# Altium footprint library Protection.PcbLib: 8 footprints
Each footprint in its own frame and in the unit in brackets; x right, y up, seen from the top. Pads: shape width x height; smd on the part's side, far side on the other; paste and mask are expansions set on the pad; w line width, h text height; cw(c..) or ccw(c..) is an arc to the next point about the centre after c.
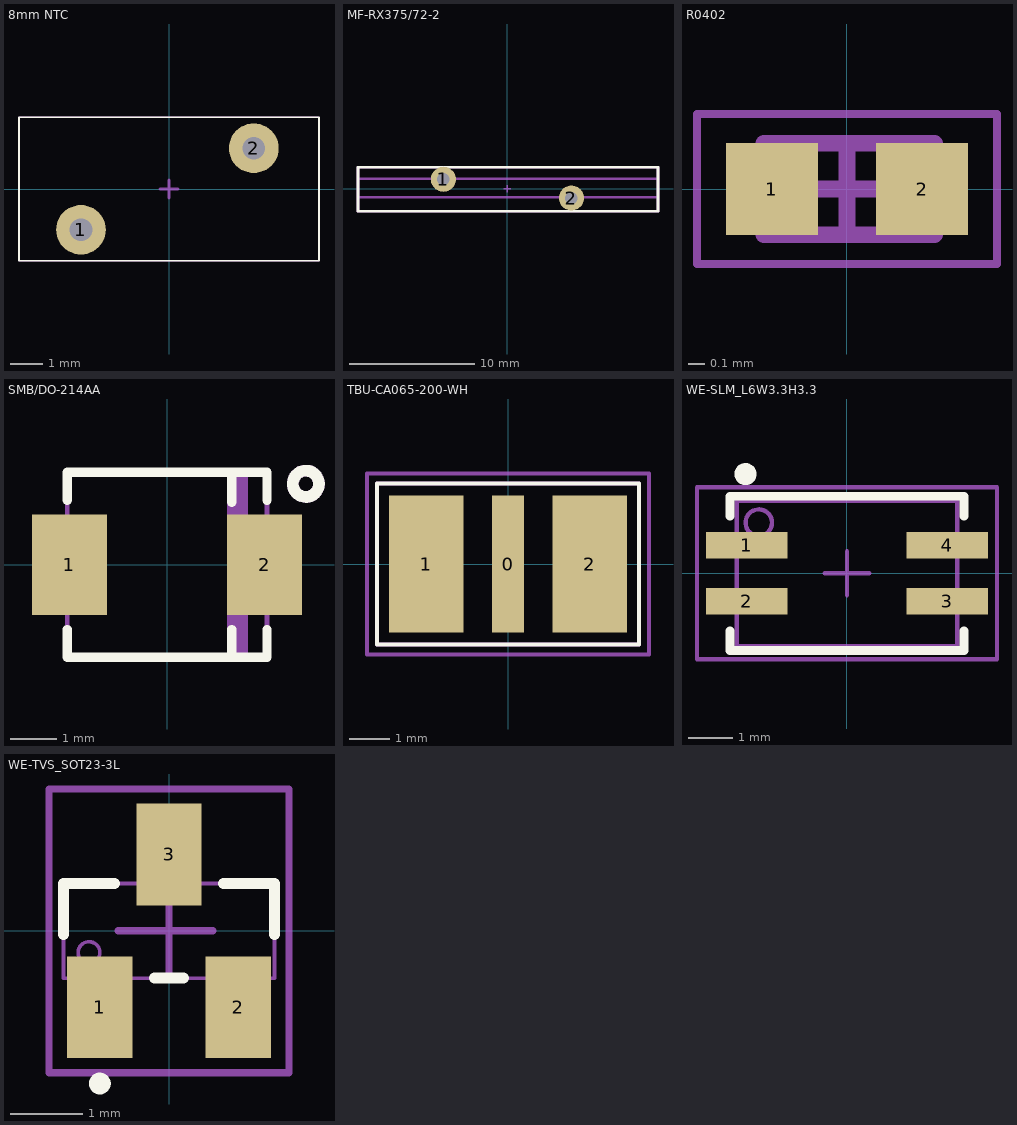
[diagram p0: the footprints below, top view; thin cyan lines are the x and y axes]

## 8mm NTC [mm]
height 0.4
pads (2):
  round 1.524 hole 0.7: 1(-2.7,-1.25) 2(2.6,1.25)
Top Overlay:
  lines w0.05: -4.6,-2.2 4.6,-2.2 4.6,2.2 -4.6,2.2 -4.6,-2.2
Top Assembly (Mech13):
  lines w0.05: -4.6,-2.2 4.6,-2.2 4.6,2.2 -4.6,2.2 -4.6,-2.2
  text ".Designator" at -0.775,-0.008 h0.2
Mechanical 15:
  lines w0.05: -4.6,-2.2 4.6,-2.2 4.6,2.2 -4.6,2.2 -4.6,-2.2
  lines w0.1: -0.275,0 0.275,0 ; 0,-0.275 0,0.275
3D body "User Library-SL08 20002.step": height 14.5, standoff -32.5, extent -4.5,-2.15 4.5,2.15

## MF-RX375/72-2 [mm]
height 0.4
pads (2):
  round 2 hole 1: 1(-5.1,0.75) 2(5.1,-0.75)
Top Overlay:
  lines w0.2: -11.9,-1.8 -1.199,-1.8 12,-1.8 12,1.7 1.3,1.7 -11.9,1.7 -11.9,-1.8
Top Assembly (Mech13):
  circle w0.7: c-5.1,0.75 r0.25
  circle w0.7: c5.1,-0.75 r0.25
  lines w0.2: -11.9,-0.7 -1.099,-0.7 12,-0.7 12,0.8 1.2,0.8 -11.9,0.8 -11.9,-0.7
  text ".Designator" at -2.499,-0.167 h0.5
Mechanical 15:
  lines w0.1: -0.275,0 0.275,0 ; 0,-0.275 0,0.275
  lines w0.2: -11.9,-1.8 -1.199,-1.8 12,-1.8 12,1.7 1.3,1.7 -11.9,1.7 -11.9,-1.8
3D body "mf-rx375_72.stp": height 26.75, standoff -10.35, extent -11.755,-1.55 11.755,1.55

## PCBComponent_1 [mm]

## R0402 [mm] "Chip Resistor, 2-Leads, Body 1.00x0.50mm, IPC Medium Density"
height 0.4
pads (2):
  rect 0.55x0.55 smd: 1(-0.45,0) 2(0.45,0)
Top Assembly (Mech13):
  rectangle: -0.5,-0.296 -0.39,0.275
  region: 0.525,0.296 0.415,0.296 0.415,-0.275 0.525,-0.275
  lines w0.1: -0.5,-0.275 -0.5,0.275 0.525,0.275 0.525,-0.275 -0.5,-0.275
  text ".Designator" at -0.356,-0.037 h0.2
Mechanical 15:
  lines w0.05: -0.9,-0.45 0.9,-0.45 0.9,0.45 -0.9,0.45 -0.9,-0.45
  lines w0.1: -0.275,0 0.275,0 ; 0,-0.275 0,0.275
3D body "SMD_0402.step": height 0.36, standoff 0.01, extent -0.5,-0.25 0.5,0.25

## SMB/DO-214AA [mm]
pads (2):
  rect 1.62x2.18 smd: 1(-2.11,0) 2(2.11,0)
Top Overlay:
  circle w0.254: c3,1.75 r0.284
  lines w0.2: -2.159,-1.397 -2.159,-2 2.159,-2 2.159,-1.397 ; -2.159,1.397 -2.159,2 2.159,2 2.159,1.397 ; 1.397,-2 1.397,-1.397 ; 1.397,1.349 1.397,1.953
Top Assembly (Mech13):
  circle w0.254: c3,1.75 r0.284
  rectangle: 1.299,-2 1.75,2
  rectangle: -2.75,-1 -2.159,1
  region: 2.752,1 2.159,1 2.159,-1 2.752,-1
  lines w0.1: 0,-2 -2.159,-2 -2.159,2 0,2 ; 0.003,-2 2.159,-2 2.159,2 0.003,2
  text ".Designator" at -2.498,-0.167 h0.5
3D body "SMB_DO-214AA.step": height 2.45, standoff 0.03, extent -2.748,-1.95 2.752,1.95

## TBU-CA065-200-WH [mm] "Chip Resistor, 2-Leads, Body 1.00x0.50mm, IPC Medium Density"
height 0.4
pads (3):
  rect 0.8x3.4 smd: 0(0,0)
  rect 1.85x3.4 smd: 1(-2.025,0) 2(2.025,0)
Top Overlay:
  lines w0.1: -3.25,-2 3.25,-2 3.25,2 -3.25,2 -3.25,-2
Top Assembly (Mech13):
  circle w0.1: c-2.5,-1.3 r0.224
  lines w0.1: -3.25,-2 3.25,-2 3.25,2 -3.25,2 -3.25,-2
  text ".Designator" at -2.499,-0.167 h0.5
Mechanical 15:
  lines w0.1: -0.275,0 0.275,0 ; 0,-0.275 0,0.275 ; -3.5,-2.25 -3.5,2.25 3.5,2.25 3.5,-2.25 -3.5,-2.25
3D body "SMD_0402.step": height 0.36, standoff 0.01, extent -0.5,-0.25 0.5,0.25
3D body "tbu-ca.stp": height 0.89, standoff 0.01, extent -3.25,-2 3.25,2

## WE-SLM_L6W3.3H3.3 [mm] "SMD Inductor, 4-Leads, Body 5x3.3mm"
height 3.3
pads (4):
  rect 1.85x0.6 smd: 1(-2.275,0.635) 2(-2.275,-0.635) 3(2.275,-0.635) 4(2.275,0.635)
Top Overlay:
  circle w0.25: c-2.3,2.25 r0.125
  lines w0.2: -2.65,-1.3 -2.65,-1.75 2.65,-1.75 2.65,-1.3 ; -2.65,1.3 -2.65,1.75 2.65,1.75 2.65,1.3
Top Assembly (Mech13):
  circle w0.1: c-2,1.15 r0.3
  rectangle: -2.8,0.4 -2.5,0.9
  region: 2.8,0.9 2.5,0.9 2.5,0.4 2.8,0.4
  region: 2.8,-0.37 2.5,-0.37 2.5,-0.87 2.8,-0.87
  rectangle: -2.8,-0.9 -2.5,-0.4
  lines w0.1: -2.5,-1.65 2.5,-1.65 2.5,1.65 -2.5,1.65 -2.5,-1.65
  text ".Designator" at -5.998,-0.4 h1.2
Mechanical 15:
  lines w0.1: -0.5,0 0.5,0 ; 0,-0.5 0,0.5 ; -3.4,-1.95 3.4,-1.95 3.4,1.95 -3.4,1.95 -3.4,-1.95
3D body "WE-SLM_744242.stp": height 3.25, standoff 0, extent -3,-1.65 3,1.65

## WE-TVS_SOT23-3L [mm] "TVS Diode, package SOT23-3L"
height 1.2
pads (3):
  rect 0.9x1.4 smd: 1(-0.95,-1.05) 2(0.95,-1.05) 3(0,1.05)
Top Overlay:
  circle w0.15: c-0.95,-2.1 r0.075
  lines w0.15: -1.45,-0.05 -1.45,0.65 -0.75,0.65 ; -0.2,-0.65 0.2,-0.65 ; 0.75,0.65 1.45,0.65 1.45,-0.05
Top Assembly (Mech13):
  circle w0.05: c-1.1,-0.3 r0.15
  rectangle: -0.2,0.65 0.2,1.2
  rectangle: 0.75,-1.2 1.15,-0.65
  rectangle: -1.15,-1.2 -0.75,-0.65
  lines w0.05: -1.15,-0.65 -1.15,-1.2 -0.75,-1.2 -0.75,-0.65 ; -0.2,0.65 -0.2,1.2 0.2,1.2 0.2,0.65 ; 0.75,-0.65 0.75,-1.2 1.15,-1.2 1.15,-0.65 ; -1.45,-0.65 -1.45,0.65 1.45,0.65 1.45,-0.65 -1.45,-0.65
  text ".Designator" at -1.999,-0.133 h0.4
Mechanical 15:
  lines w0.1: -0.7,0 0.6,0 ; 0,-0.65 0,0.65 ; -1.65,-1.95 -1.65,1.95 1.65,1.95 1.65,-1.95 -1.65,-1.95
3D body "STEP-WE-TVS-SOT23-3L-rev1.stp": height 1.04, standoff 0, extent -1.45,-1.2 1.45,1.2